# Altium schematic symbol library AT25SF128A-SHB-T.SchLib: 1 symbol
Pins are listed as number, name and electrical type; pins without a type are passive.

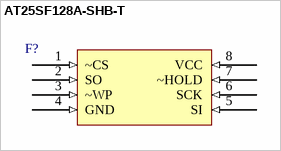
[diagram p0: symbol AT25SF128A-SHB-T]

## AT25SF128A-SHB-T
designator F?  (value not drawn)
pins: 1 ~CS (in), 2 SO (in), 3 ~WP (in), 4 GND (in), 5 SI (in), 6 SCK (in), 7 ~HOLD (in), 8 VCC (in)